# Altium footprint library Count-.PcbLib: 34 footprints (part 2 of 3)
Each footprint in its own frame and in the unit in brackets; x right, y up, seen from the top. Pads: shape width x height; smd on the part's side, far side on the other; paste and mask are expansions set on the pad; w line width, h text height; cw(c..) or ccw(c..) is an arc to the next point about the centre after c.
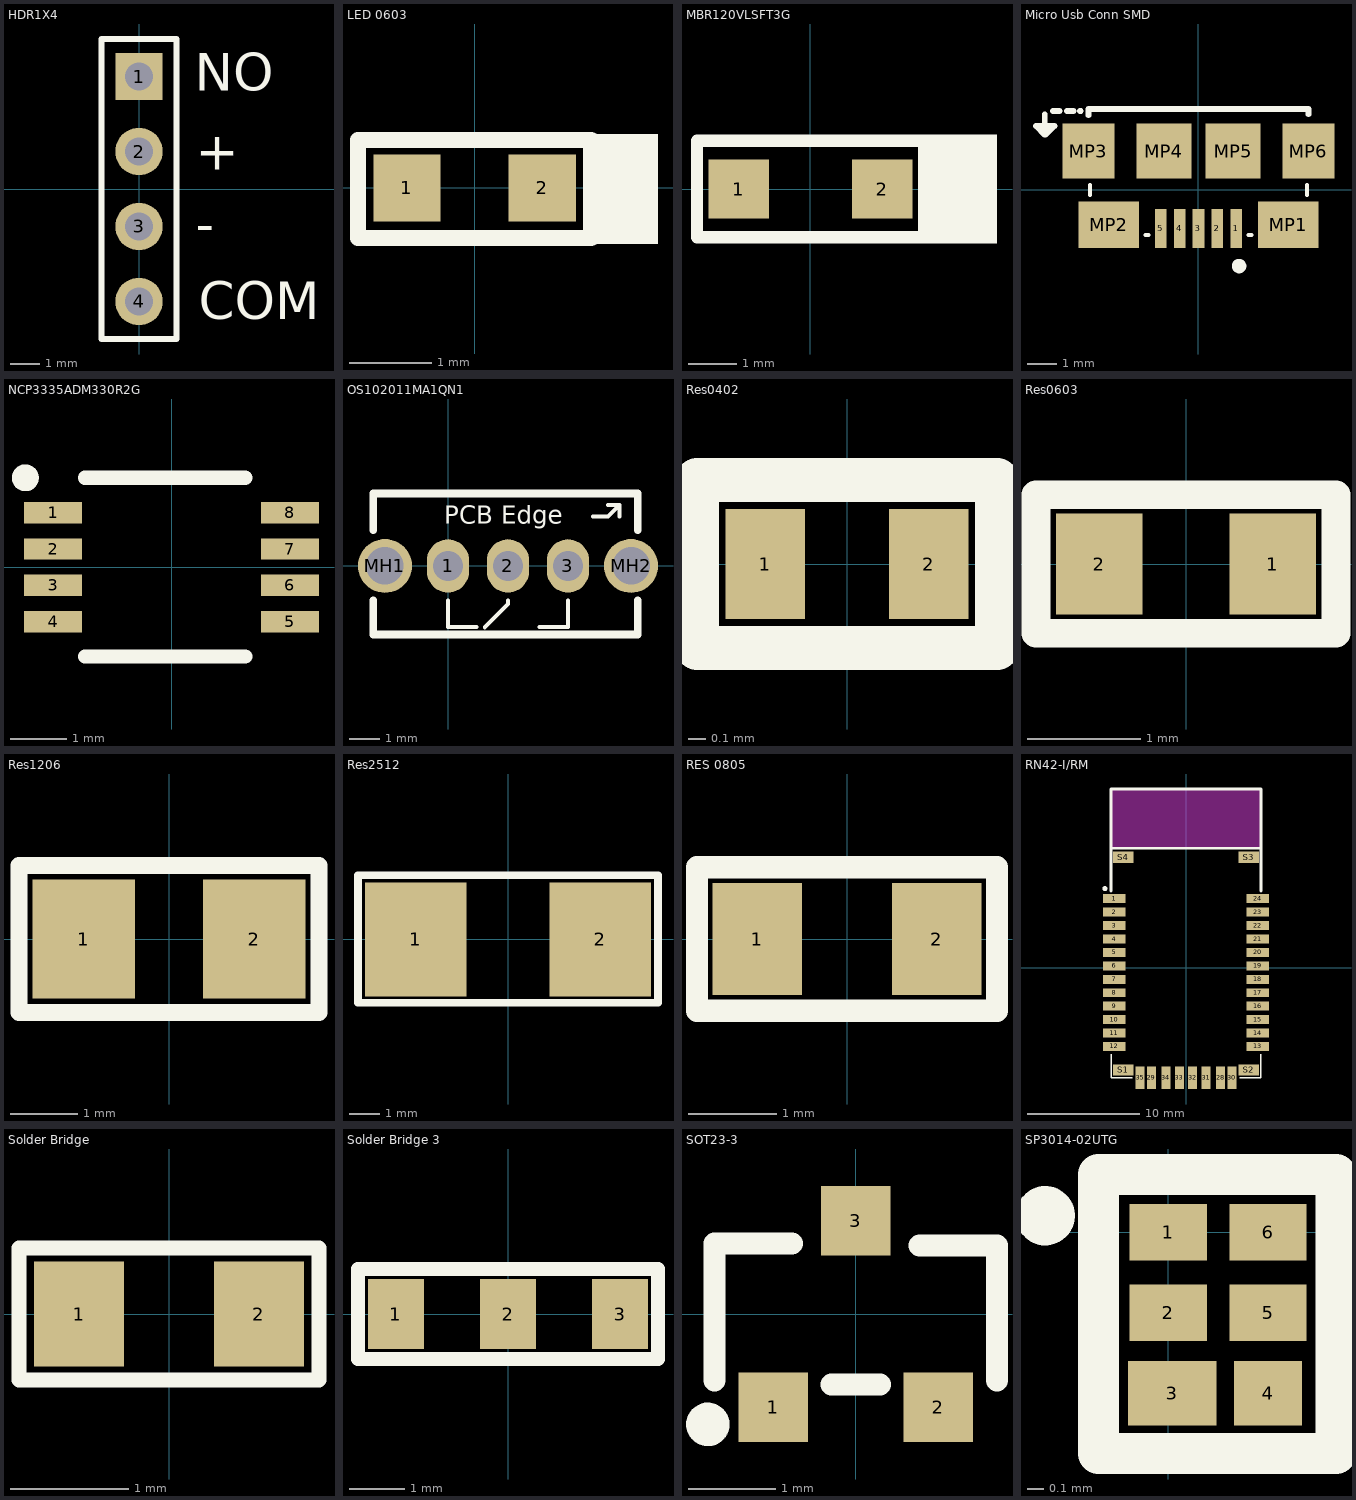
[diagram p1: the footprints below, top view; thin cyan lines are the x and y axes]

## HDR1X4 [mm] "Connector; Header; 4 Position"
pads (4):
  rect 1.6x1.6 hole 0.95: 1(0,3.81)
  round 1.6 hole 0.95: 2(0,1.27) 3(0,-1.27) 4(0,-3.81)
Top Overlay:
  lines w0.2: -1.27,-5.08 -1.27,5.08 1.27,5.08 1.27,-5.08 -1.27,-5.08
  text "COM" at 2.032,-4.42 h1.27
  text "-" at 1.93,-1.803 h1.27
  text "+" at 1.93,0.66 h1.27
  text "NO" at 1.88,3.327 h1.27
3D body "User Library-1x4 TH Pitch 2_54mm.STEP": height 9.5, standoff -3.2, extent -1.27,-5.08 1.27,5.08

## LED 0603 [mm]
pads (2):
  rect 0.82x0.82 smd: 1(-0.825,0) 2(0.825,0)
Top Overlay:
  region: 2.235,0.66 1.422,0.66 1.422,-0.686 2.235,-0.686
  lines w0.2: -1.422,-0.61 -1.422,0.584 1.422,0.584 1.422,-0.61 -1.422,-0.61
3D body "User Library-SMD LED 0603.step": height 0.38, standoff -0.01, extent -0.8,-0.4 0.8,0.4

## MBR120VLSFT3G [mm] "DIODE SCHOTTKY 20V 1A SOD123FL"
pads (2):
  rect 1.25x1.22 smd: 1(-1.475,0) 2(1.475,0)
Top Overlay:
  region: 3.837,1.118 2.212,1.118 2.212,-1.118 3.837,-1.118
  lines w0.254: -2.335,-0.991 -2.335,0.991 2.694,0.991 ; -2.31,-0.991 2.72,-0.991
3D body "User Library-SOD123F.step": height 1.2, standoff -0.01, extent -1.874,-0.85 1.876,0.85

## Micro Usb Conn SMD [mm] "CONN RCPT USB2.0 MICRO B SMD R/A"
pads (11):
  rect 0.4x1.35 smd: 1(1.3,-1.338) 2(0.65,-1.338) 3(0,-1.338) 4(-0.65,-1.338) 5(-1.3,-1.338)
  rect 2.1x1.6 smd: MP1(3.1,-1.212) MP2(-3.1,-1.212)
  rect 1.8x1.9 smd: MP3(-3.8,1.338) MP6(3.8,1.338)
  rect 1.9x1.9 smd: MP4(-1.2,1.338) MP5(1.2,1.338)
Top Overlay:
  circle w0.3: c1.4,-2.638 r0.1
  lines w0.127: -3.75,-0.188 -3.75,0.162 ; -1.83,-1.563 -1.72,-1.563 ; 1.72,-1.563 1.83,-1.563 ; 3.75,-0.188 3.75,0.162
  lines w0.2: -5.309,2.611 -5.309,1.9 -5.613,2.204 -4.978,2.204 -5.283,1.9 ; -5.029,2.718 -4.801,2.718 ; -4.547,2.718 -4.318,2.718 ; -4.089,2.718 -4.064,2.718 ; -3.8,2.575 -3.8,2.788 3.8,2.788 3.8,2.611
3D body "10118192C.stp": height 2.74, standoff -0.27, extent -3.95,-1.575 3.962,4.086

## NCP3335ADM330R2G [mm]
pads (8):
  rect 1.04x0.38 smd: 1(-2.12,0.975) 2(-2.12,0.325) 3(-2.12,-0.325) 4(-2.12,-0.975) 5(2.12,-0.975) 6(2.12,-0.325) 7(2.12,0.325) 8(2.12,0.975)
Top Overlay:
  circle w0.254: c-2.616,1.6 r0.114
  lines w0.254: -1.549,-1.6 1.321,-1.6 ; -1.549,1.6 1.321,1.6
3D body "User Library-MSOP-8 MSOP-8L.step": height 1.01, standoff 0, extent -2.46,-1.525 2.46,1.525

## OS102011MA1QN1 [mm] "2 Position SPDT Miniature Slide Switch 100MA 12V Through Hole, Right Angle"
pads (5):
  oval 1.4x1.778 hole 1: 1(0,0) 2(2,0) 3(4,0)
  round 1.8 hole 1.25: MH1(-2.1,0) MH2(6.1,0)
Top Overlay:
  lines w0.127: 0,-1.143 0,-2.032 0.952,-2.032 ; 1.222,-2.048 2,-1.27 2,-1.143 ; 3.048,-2.032 4,-2.032 4,-1.143 ; 4.826,1.651 5.334,1.651 5.715,2.032 ; 5.334,2.032 5.715,2.032 ; 5.715,1.651 5.715,2.032
  lines w0.254: -2.489,-1.143 -2.489,-2.286 6.325,-2.286 6.325,-1.143 ; -2.489,1.194 -2.489,2.413 6.325,2.413 6.325,1.194
  text "PCB Edge" at -0.127,1.397 h0.6
3D body "User Library-CK_Slide.step": height 4.71, standoff -2.78, extent -2.4,-2.286 6.21,6.086

## Res0402 [mil]
pads (2):
  rect 18x25 smd: 1(-18.5,0) 2(18.5,0)
Top Overlay:
  lines w10: -34,-19 -34,19 34,19 34,-19 -34,-19
3D body "User Library-RES_1005-0402.step": height 16.14, standoff 0, extent -22.63,-10.82 22.64,10.83

## Res0603 [mil]
pads (2):
  rect 30x35 smd: 1(30,0) 2(-30,0)
Top Overlay:
  lines w10: -52,-24 -52,24 52,24 52,-24 -52,-24
3D body "User Library-RESC1608X05N.step": height 17.76, standoff 0, extent -30.51,-16.73 30.52,16.74

## Res1206 [mil]
pads (2):
  rect 60x70 smd: 1(-50,0) 2(50,0)
Top Overlay:
  lines w10: -88,-43 -88,43 88,43 88,-43 -88,-43
3D body "User Library-1206 SMD Resistor.step": height 39.45, standoff 0, extent -62.99,-31.49 63,31.51

## Res2512 [mm]
pads (2):
  rect 3.3x3.7 smd: 1(-3,0) 2(3,0)
Top Overlay:
  lines w0.254: -4.877,-2.057 4.877,-2.057 4.877,2.083 -4.877,2.083 -4.877,-2.057
3D body "User Library-2512 SMD Resistor.step": height 1.6, standoff 0, extent -3.099,-1.5 3.251,1.5

## RES 0805 [mil] "SMD 0805"
pads (2):
  rect 40x50 smd: 1(-40,0) 2(40,0)
Top Overlay:
  lines w10: -67,-32 67,-32 67,32 -67,32 -67,-32
3D body "User Library-CR2012-0805.STEP": height 23.62, standoff 0, extent -39.34,-24.75 39.4,24.46

## RN42-I/RM [mm]
pads (36):
  rect 2x0.8 smd: 1(-6.4,6.15) 2(-6.4,4.95) 3(-6.4,3.75) 4(-6.4,2.55) 5(-6.4,1.35) 6(-6.4,0.15) 7(-6.4,-1.05) 8(-6.4,-2.25) 9(-6.4,-3.45) 10(-6.4,-4.65) 11(-6.4,-5.85) 12(-6.4,-7.05) 13(6.4,-7.05) 14(6.4,-5.85) 15(6.4,-4.65) 16(6.4,-3.45) 17(6.4,-2.25) 18(6.4,-1.05) 19(6.4,0.15) 20(6.4,1.35) 21(6.4,2.55) 22(6.4,3.75) 23(6.4,4.95) 24(6.4,6.15)
  rect 0.8x2 smd: 28(3.1,-9.85) 29(-3.1,-9.85) 30(4.1,-9.85) 31(1.8,-9.85) 32(0.6,-9.85) 33(-0.6,-9.85) 34(-1.8,-9.85) 35(-4.1,-9.85)
  rect 1.8x1 smd: S1(-5.6,-9.15) S2(5.6,-9.15) S3(5.6,9.85) S4(-5.6,9.85)
Top Overlay:
  circle w0.254: c-7.25,7.05 r0.1
  lines w0.127: -6.7,-7.75 -6.7,-9.85 -4.8,-9.85 ; 4.8,-9.85 6.7,-9.85 6.7,-7.75
  lines w0.254: -6.7,6.85 -6.7,15.95 6.7,15.95 6.7,6.85 ; -6.7,10.65 6.7,10.65
Keep-Out Layer:
  region: 6.7,10.657 -6.704,10.657 -6.704,15.95 6.7,15.95
  region: 6.7,10.667 -6.71,10.667 -6.71,15.95 6.7,15.95
3D body "RM--3DModel-STEP-56544.STEP": height 2.4, standoff 0, extent -6.7,-9.852 6.7,15.948

## Solder Bridge [mil] "Solder Bridge ON"
pads (2):
  rect 30x35 smd: 1(-30,0) 2(30,0)
Top Overlay:
  lines w5: -50,-22 -50,22 50,22 50,-22 -50,-22

## Solder Bridge 3 [mil]
pads (3):
  rect 40x50 smd: 1(-80,0) 2(0,0) 3(80,0)
Top Overlay:
  lines w10: -107,-32 107,-32 107,32 -107,32 -107,-32

## SOT23-3 [mm] "SOT23, 3-Leads, Body 2.9x1.3mm, Pitch 0.95mm, Lead Span 2.3mm - Reverse Pinning, IPC High Density"
height 1.1
pads (3):
  rect 0.8x0.8 smd: 1(-0.95,-1.075) 2(0.95,-1.075) 3(0,1.075)
Top Overlay:
  circle w0.25: c-1.702,-1.27 r0.125
  lines w0.254: -1.626,-0.762 -1.626,0.813 -0.737,0.813 ; -0.28,-0.813 0.279,-0.813 ; 0.736,0.787 1.625,0.787 1.625,-0.762
3D body "CircuitWorks-SOT-23.step": height 1.05, standoff -0.05, extent -1.5,-1.25 1.5,1.25

## SP3014-02UTG [mm]
pads (6):
  rect 0.48x0.35 smd: 1(0,0) 2(0,-0.5) 5(0.62,-0.5) 6(0.62,0)
  rect 0.55x0.4 smd: 3(0.025,-1)
  rect 0.42x0.4 smd: 4(0.62,-1)
Top Overlay:
  circle w0.254: c-0.762,0.102 r0.057
  lines w0.254: -0.432,-1.372 1.041,-1.372 1.041,0.356 -0.432,0.356 -0.432,-1.372